# Altium footprint library General.PcbLib: 40 footprints (part 3 of 3)
Each footprint in its own frame and in the unit in brackets; x right, y up, seen from the top. Pads: shape width x height; smd on the part's side, far side on the other; paste and mask are expansions set on the pad; w line width, h text height; cw(c..) or ccw(c..) is an arc to the next point about the centre after c.
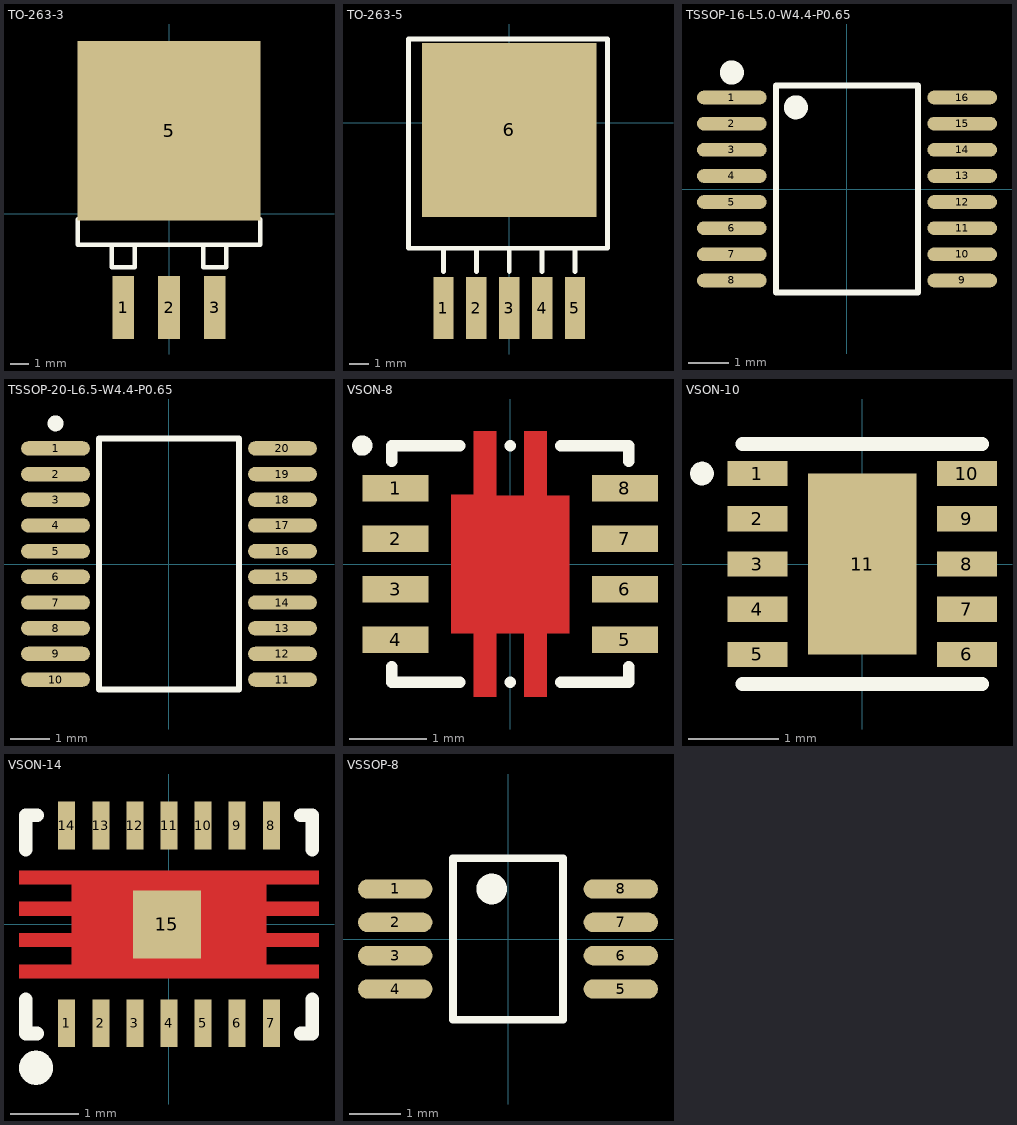
[diagram p2: the footprints below, top view; thin cyan lines are the x and y axes]

## TO-263-3 [mm] "TO-263-3"
pads (4):
  rect 1.2x3.5 smd mask+0.051: 1(-2.54,-5.219) 2(0,-5.219) 3(2.54,-5.219)
  rect 10.2x10 smd mask+0.051: 5(0,4.632)
Top Overlay:
  lines w0.254: -5.08,-0.314 -5.08,-1.711 5.08,-1.711 5.08,-0.314 ; -3.175,-1.838 -3.175,-2.981 -1.905,-2.981 -1.905,-1.838 ; 1.905,-1.838 1.905,-2.981 3.175,-2.981 3.175,-1.838
3D body "User Library-TO263-3.STEP": height 4.78, standoff -0.02, extent -5.01,-6.047 4.99,9.623

## TO-263-5 [mm] "TO-263-5"
height 4.83
pads (6):
  rect 1.05x3.2 smd: 1(-3.4,-9.592) 2(-1.7,-9.592) 3(0,-9.592) 4(1.7,-9.592) 5(3.4,-9.592)
  rect 9x9 smd: 6(0,-0.381)
Top Overlay:
  lines w0.254: -3.4,-7.7 -3.4,-6.5 ; -1.7,-7.7 -1.7,-6.5 ; 0,-7.7 0,-6.5 ; 1.7,-7.7 1.7,-6.5 ; 3.4,-7.7 3.4,-6.5 ; -5.207,-6.5 5.08,-6.5 5.08,4.318 -5.207,4.318 -5.207,-6.5
3D body "TO-263-5.STEP": height 4.56, standoff 0, extent -5.1,-10.1 5.06,3.915

## TSSOP-16-L5.0-W4.4-P0.65 [mil] "L5.0-W4.4-P0.65"
pads (16):
  oval 68.2x13.5 smd mask+2: 1(-112.8,89.6) 2(-112.8,64) 3(-112.8,38.4) 4(-112.8,12.8) 5(-112.8,-12.8) 6(-112.8,-38.4) 7(-112.8,-64) 8(-112.8,-89.6) 9(112.8,-89.6) 10(112.8,-64) 11(112.8,-38.4) 12(112.8,-12.8) 13(112.8,12.8) 14(112.8,38.4) 15(112.8,64) 16(112.8,89.6)
Top Overlay:
  circle w11.8: c-50,80 r5.9
  circle w11.8: c-112.8,114.1 r5.9
  lines w6: -69.7,-101.4 69.7,-101.4 69.7,101.4 -69.7,101.4 -69.7,-101.4
3D body "User Library-TSSOP-16-1.step": height 43.31, standoff 0, extent -125.98,-98.43 125.98,98.43

## TSSOP-20-L6.5-W4.4-P0.65 [mm] "L6.5-W4.4-P0.65"
pads (20):
  oval 1.742x0.364 smd: 1(-2.871,2.925) 2(-2.871,2.275) 3(-2.871,1.625) 4(-2.871,0.975) 5(-2.871,0.325) 6(-2.871,-0.325) 7(-2.871,-0.975) 8(-2.871,-1.625) 9(-2.871,-2.275) 10(-2.871,-2.925) 11(2.871,-2.925) 12(2.871,-2.275) 13(2.871,-1.625) 14(2.871,-0.975) 15(2.871,-0.325) 16(2.871,0.325) 17(2.871,0.975) 18(2.871,1.625) 19(2.871,2.275) 20(2.871,2.925)
Top Overlay:
  circle w0.3: c-2.871,3.559 r0.051
  lines w0.152: -1.771,-3.175 -1.771,3.176 1.771,3.176 1.771,-3.175 -1.771,-3.175
3D body "TSSOP-20.step": height 1.03, standoff -0.02, extent -3.203,-3.25 3.203,3.25

## VSON-8 [mm] "L3.0-W3.0-P0.65"
pads (8):
  rect 0.85x0.34 smd paste+0 mask+0.051: 1(-1.476,0.975) 2(-1.476,0.325) 3(-1.476,-0.325) 4(-1.476,-0.975) 5(1.476,-0.975) 6(1.476,-0.325) 7(1.476,0.325) 8(1.476,0.975)
Top Layer:
  region: -0.76,0.89 -0.47,0.89 -0.47,1.71 -0.18,1.71 -0.18,0.88 0.18,0.88 0.18,1.71 0.47,1.71 0.47,0.88 0.76,0.88 0.76,-0.89 0.47,-0.89 0.47,-1.71 0.18,-1.71 0.18,-0.89 -0.18,-0.89 -0.18,-1.71 -0.47,-1.71 -0.47,-0.89 -0.76,-0.89 -0.76,0.89
Top Overlay:
  circle w0.15: c-1.905,1.524 r0.055
  lines w0.15: -1.524,-1.325 -1.524,-1.524 -0.649,-1.524 ; -1.524,1.325 -1.524,1.524 -0.649,1.524 ; -0.001,-1.524 0.001,-1.524 ; -0.001,1.524 0.001,1.524 ; 0.649,-1.524 1.524,-1.524 1.524,-1.325 ; 0.649,1.524 1.524,1.524 1.524,1.325
3D body "1792A7D0C53978ED518F12673F774468.STEP": height 1, standoff 0, extent -1.5,-1.505 1.5,1.495

## VSON-10 [mm] "L2.5-W2.5-P0.50"
pads (11):
  rect 0.665x0.28 smd paste+0 mask+0.051: 1(-1.158,1) 2(-1.158,0.5) 3(-1.158,0) 4(-1.158,-0.5) 5(-1.158,-1) 6(1.158,-1) 7(1.158,-0.5) 8(1.158,0) 9(1.158,0.5) 10(1.158,1)
  rect 1.2x2 smd paste+0 mask+0.051: 11(0,0)
Top Overlay:
  circle w0.15: c-1.77,1 r0.055
  lines w0.152: -1.326,-1.326 1.326,-1.326 ; -1.326,1.326 1.326,1.326
3D body "User Library-DSK-10.step": height 0.9, standoff 0.05, extent -1.35,-1.294 1.35,1.306

## VSON-14 [mm] "L4.0-W3.0-P0.50"
pads (15):
  rect 0.25x0.7 smd paste+0 mask+0.051: 1(-1.5,-1.45) 2(-1,-1.45) 3(-0.5,-1.45) 4(0,-1.45) 5(0.5,-1.45) 6(1,-1.45) 7(1.5,-1.45) 8(1.5,1.45) 9(1,1.45) 10(0.5,1.45) 11(0,1.45) 12(-0.5,1.45) 13(-1,1.45) 14(-1.5,1.45)
  rect 1x1 smd: 15(-0.03,0)
Top Layer:
  region: -2.2,0.79 -2.2,0.59 -1.43,0.59 -1.43,0.33 -2.2,0.33 -2.2,0.13 -1.43,0.13 -1.43,-0.13 -2.2,-0.13 -2.2,-0.33 -1.43,-0.33 -1.43,-0.59 -2.2,-0.59 -2.2,-0.79 2.2,-0.79 2.2,-0.59 1.43,-0.59 1.43,-0.33 2.2,-0.33 2.2,-0.13 1.43,-0.13 1.43,0.13 2.2,0.13 2.2,0.33 1.43,0.33 1.43,0.59 2.2,0.59 2.2,0.79
Top Overlay:
  lines w0.2: -2.1,-1.1 -2.1,-1.6 -1.93,-1.6 ; -2.1,1.1 -2.1,1.6 -1.93,1.6 ; 1.93,-1.6 2.1,-1.6 2.1,-1.1 ; 1.93,1.6 2.1,1.6 2.1,1.1
  lines w0.25: -1.951,-1.976 ccw(c-1.949,-2.101) -1.948,-1.976
3D body "VFDFN-14.STEP": height 0.97, standoff 0, extent -2.08,-1.58 2.08,1.58

## VSSOP-8 [mm] "L3.0-W3.0-P0.65"
pads (8):
  oval 1.45x0.38 smd paste+0 mask+0.051: 1(-2.2,0.975) 2(-2.2,0.325) 3(-2.2,-0.325) 4(-2.2,-0.975) 5(2.2,-0.975) 6(2.2,-0.325) 7(2.2,0.325) 8(2.2,0.975)
Top Overlay:
  circle w0.3: c-0.319,0.975 r0.15
  lines w0.152: -1.071,-1.576 1.071,-1.576 1.071,1.576 -1.071,1.576 -1.071,-1.576
3D body "User Library-VSSOP8 3x3 e0_65-1.step": height 1.1, standoff 0, extent -2.5,-1.506 2.5,1.494